# Altium footprint library MY_LIB_Connectors.PcbLib: 358 footprints (part 2 of 23)
Each footprint in its own frame and in the unit in brackets; x right, y up, seen from the top. Pads: shape width x height; smd on the part's side, far side on the other; paste and mask are expansions set on the pad; w line width, h text height; cw(c..) or ccw(c..) is an arc to the next point about the centre after c.
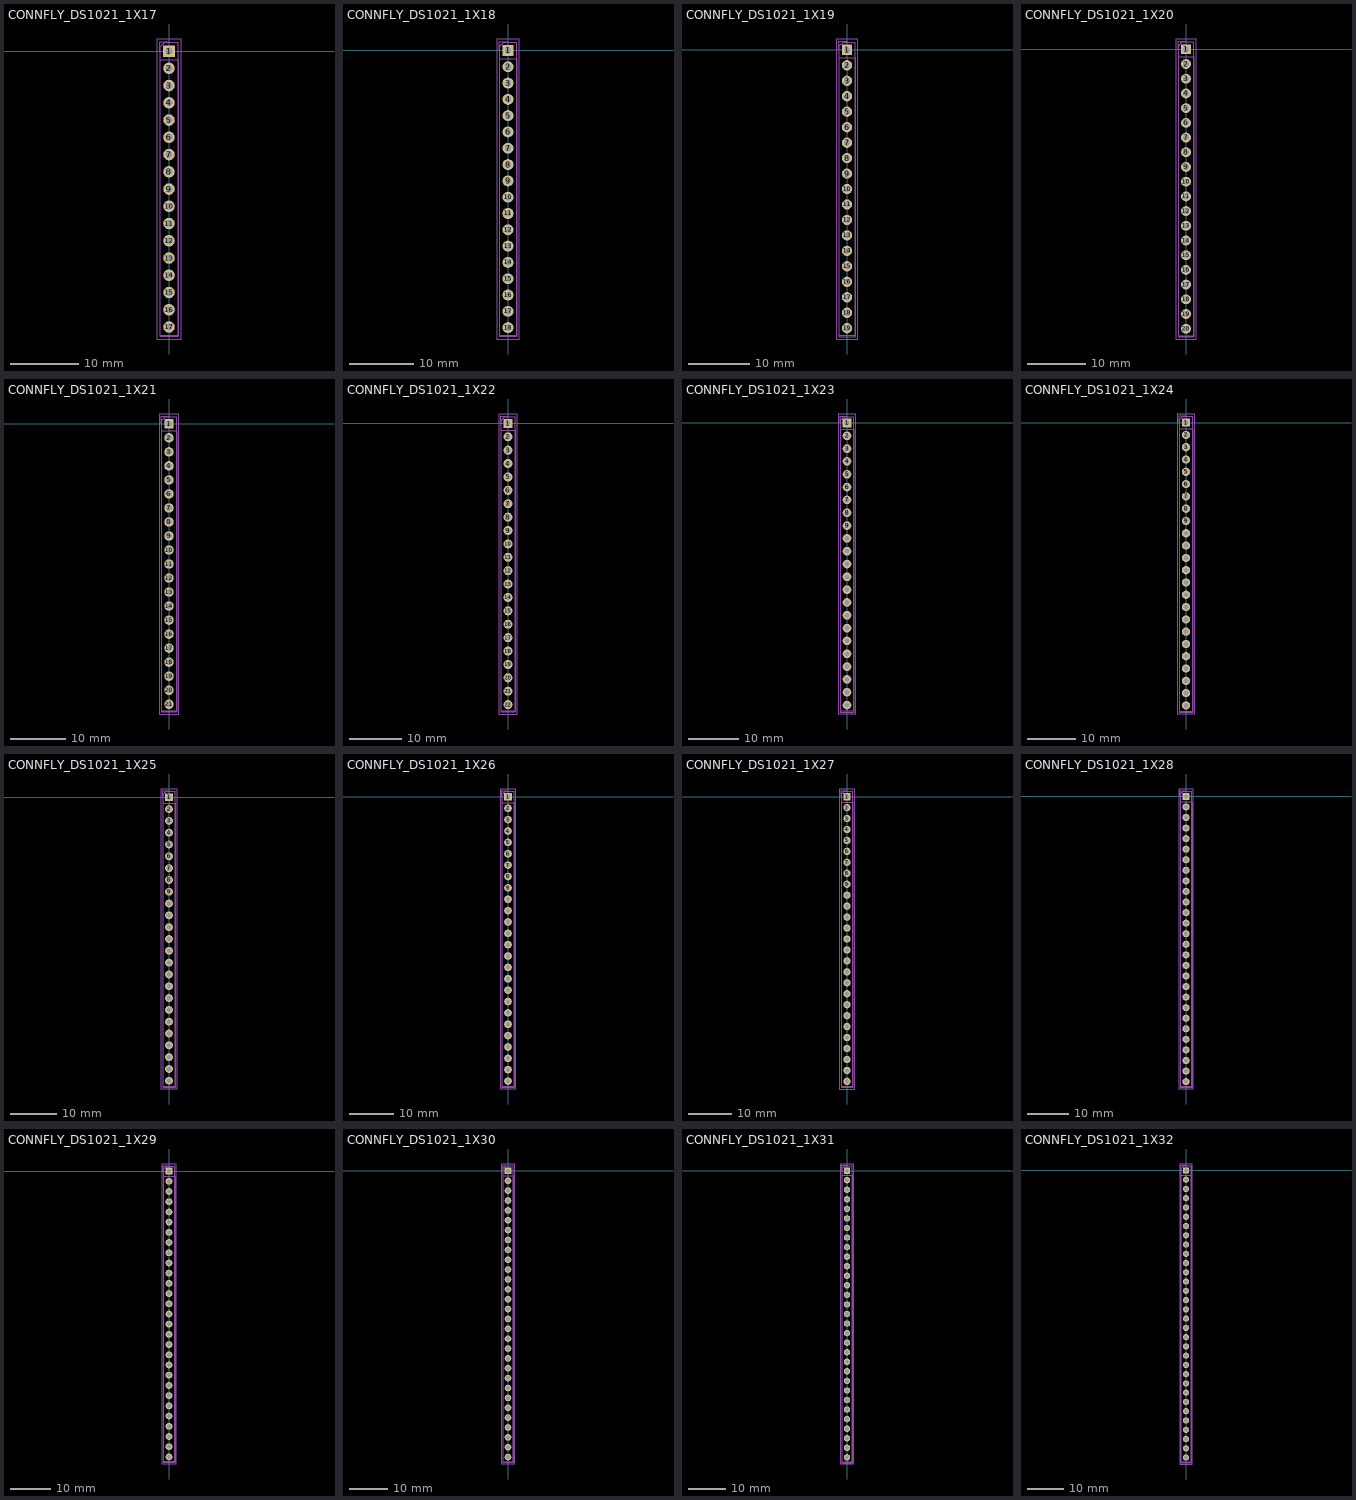
[diagram p1: the footprints below, top view; thin cyan lines are the x and y axes]

## CONNFLY_DS1021_1X17 [mm] "Connfly DS1021 1x17 standard KiCad; PTH1.0 pad1.7 pitch2.54; CC-BY-SA-4.0; STEP generic"
height 8.54
pads (17):
  rect 1.7x1.7 hole 1 paste-2539.97 mask+0.05: 1(0,0)
  round 1.7 hole 1 paste-2539.97 mask+0.05: 2(0,-2.54) 3(0,-5.08) 4(0,-7.62) 5(0,-10.16) 6(0,-12.7) 7(0,-15.24) 8(0,-17.78) 9(0,-20.32) 10(0,-22.86) 11(0,-25.4) 12(0,-27.94) 13(0,-30.48) 14(0,-33.02) 15(0,-35.56) 16(0,-38.1) 17(0,-40.64)
Mechanical 15:
  lines w0.05: -1.77,-42.41 -1.77,1.78 1.77,1.78 1.77,-42.41 -1.77,-42.41
  lines w0.1: -1.27,-41.91 -1.27,0.635 -0.635,1.27 1.27,1.27 1.27,-41.91 -1.27,-41.91
  lines w0.12: -1.38,0 -1.38,1.38 0,1.38 ; -1.38,-42.02 -1.38,-1.27 1.38,-1.27 1.38,-42.02 -1.38,-42.02
3D body "PinHeader_1x17_P2.54mm_Vertical.step": height 8.54, standoff -3, extent -1.27,-41.91 1.27,1.27

## CONNFLY_DS1021_1X18 [mm] "Connfly DS1021 1x18 standard KiCad; PTH1.0 pad1.7 pitch2.54; CC-BY-SA-4.0; STEP generic"
height 8.54
pads (18):
  rect 1.7x1.7 hole 1 paste-2539.97 mask+0.05: 1(0,0)
  round 1.7 hole 1 paste-2539.97 mask+0.05: 2(0,-2.54) 3(0,-5.08) 4(0,-7.62) 5(0,-10.16) 6(0,-12.7) 7(0,-15.24) 8(0,-17.78) 9(0,-20.32) 10(0,-22.86) 11(0,-25.4) 12(0,-27.94) 13(0,-30.48) 14(0,-33.02) 15(0,-35.56) 16(0,-38.1) 17(0,-40.64) 18(0,-43.18)
Mechanical 15:
  lines w0.05: -1.77,-44.95 -1.77,1.78 1.77,1.78 1.77,-44.95 -1.77,-44.95
  lines w0.1: -1.27,-44.45 -1.27,0.635 -0.635,1.27 1.27,1.27 1.27,-44.45 -1.27,-44.45
  lines w0.12: -1.38,0 -1.38,1.38 0,1.38 ; -1.38,-44.56 -1.38,-1.27 1.38,-1.27 1.38,-44.56 -1.38,-44.56
3D body "PinHeader_1x18_P2.54mm_Vertical.step": height 8.54, standoff -3, extent -1.27,-44.45 1.27,1.27

## CONNFLY_DS1021_1X19 [mm] "Connfly DS1021 1x19 standard KiCad; PTH1.0 pad1.7 pitch2.54; CC-BY-SA-4.0; STEP generic"
height 8.54
pads (19):
  rect 1.7x1.7 hole 1 paste-2539.97 mask+0.05: 1(0,0)
  round 1.7 hole 1 paste-2539.97 mask+0.05: 2(0,-2.54) 3(0,-5.08) 4(0,-7.62) 5(0,-10.16) 6(0,-12.7) 7(0,-15.24) 8(0,-17.78) 9(0,-20.32) 10(0,-22.86) 11(0,-25.4) 12(0,-27.94) 13(0,-30.48) 14(0,-33.02) 15(0,-35.56) 16(0,-38.1) 17(0,-40.64) 18(0,-43.18) 19(0,-45.72)
Mechanical 15:
  lines w0.05: -1.77,-47.49 -1.77,1.78 1.77,1.78 1.77,-47.49 -1.77,-47.49
  lines w0.1: -1.27,-46.99 -1.27,0.635 -0.635,1.27 1.27,1.27 1.27,-46.99 -1.27,-46.99
  lines w0.12: -1.38,0 -1.38,1.38 0,1.38 ; -1.38,-47.1 -1.38,-1.27 1.38,-1.27 1.38,-47.1 -1.38,-47.1
3D body "PinHeader_1x19_P2.54mm_Vertical.step": height 8.54, standoff -3, extent -1.27,-46.99 1.27,1.27

## CONNFLY_DS1021_1X20 [mm] "Connfly DS1021 1x20 standard KiCad; PTH1.0 pad1.7 pitch2.54; CC-BY-SA-4.0; STEP generic"
height 8.54
pads (20):
  rect 1.7x1.7 hole 1 paste-2539.97 mask+0.05: 1(0,0)
  round 1.7 hole 1 paste-2539.97 mask+0.05: 2(0,-2.54) 3(0,-5.08) 4(0,-7.62) 5(0,-10.16) 6(0,-12.7) 7(0,-15.24) 8(0,-17.78) 9(0,-20.32) 10(0,-22.86) 11(0,-25.4) 12(0,-27.94) 13(0,-30.48) 14(0,-33.02) 15(0,-35.56) 16(0,-38.1) 17(0,-40.64) 18(0,-43.18) 19(0,-45.72) 20(0,-48.26)
Mechanical 15:
  lines w0.05: -1.77,-50.03 -1.77,1.78 1.77,1.78 1.77,-50.03 -1.77,-50.03
  lines w0.1: -1.27,-49.53 -1.27,0.635 -0.635,1.27 1.27,1.27 1.27,-49.53 -1.27,-49.53
  lines w0.12: -1.38,0 -1.38,1.38 0,1.38 ; -1.38,-49.64 -1.38,-1.27 1.38,-1.27 1.38,-49.64 -1.38,-49.64
3D body "PinHeader_1x20_P2.54mm_Vertical.step": height 8.54, standoff -3, extent -1.27,-49.53 1.27,1.27

## CONNFLY_DS1021_1X21 [mm] "Connfly DS1021 1x21 standard KiCad; PTH1.0 pad1.7 pitch2.54; CC-BY-SA-4.0; STEP generic"
height 8.54
pads (21):
  rect 1.7x1.7 hole 1 paste-2539.97 mask+0.05: 1(0,0)
  round 1.7 hole 1 paste-2539.97 mask+0.05: 2(0,-2.54) 3(0,-5.08) 4(0,-7.62) 5(0,-10.16) 6(0,-12.7) 7(0,-15.24) 8(0,-17.78) 9(0,-20.32) 10(0,-22.86) 11(0,-25.4) 12(0,-27.94) 13(0,-30.48) 14(0,-33.02) 15(0,-35.56) 16(0,-38.1) 17(0,-40.64) 18(0,-43.18) 19(0,-45.72) 20(0,-48.26) 21(0,-50.8)
Mechanical 15:
  lines w0.05: -1.77,-52.57 -1.77,1.78 1.77,1.78 1.77,-52.57 -1.77,-52.57
  lines w0.1: -1.27,-52.07 -1.27,0.635 -0.635,1.27 1.27,1.27 1.27,-52.07 -1.27,-52.07
  lines w0.12: -1.38,0 -1.38,1.38 0,1.38 ; -1.38,-52.18 -1.38,-1.27 1.38,-1.27 1.38,-52.18 -1.38,-52.18
3D body "PinHeader_1x21_P2.54mm_Vertical.step": height 8.54, standoff -3, extent -1.27,-52.07 1.27,1.27

## CONNFLY_DS1021_1X22 [mm] "Connfly DS1021 1x22 standard KiCad; PTH1.0 pad1.7 pitch2.54; CC-BY-SA-4.0; STEP generic"
height 8.54
pads (22):
  rect 1.7x1.7 hole 1 paste-2539.97 mask+0.05: 1(0,0)
  round 1.7 hole 1 paste-2539.97 mask+0.05: 2(0,-2.54) 3(0,-5.08) 4(0,-7.62) 5(0,-10.16) 6(0,-12.7) 7(0,-15.24) 8(0,-17.78) 9(0,-20.32) 10(0,-22.86) 11(0,-25.4) 12(0,-27.94) 13(0,-30.48) 14(0,-33.02) 15(0,-35.56) 16(0,-38.1) 17(0,-40.64) 18(0,-43.18) 19(0,-45.72) 20(0,-48.26) 21(0,-50.8) 22(0,-53.34)
Mechanical 15:
  lines w0.05: -1.77,-55.12 -1.77,1.78 1.77,1.78 1.77,-55.12 -1.77,-55.12
  lines w0.1: -1.27,-54.61 -1.27,0.635 -0.635,1.27 1.27,1.27 1.27,-54.61 -1.27,-54.61
  lines w0.12: -1.38,0 -1.38,1.38 0,1.38 ; -1.38,-54.72 -1.38,-1.27 1.38,-1.27 1.38,-54.72 -1.38,-54.72
3D body "PinHeader_1x22_P2.54mm_Vertical.step": height 8.54, standoff -3, extent -1.27,-54.61 1.27,1.27

## CONNFLY_DS1021_1X23 [mm] "Connfly DS1021 1x23 standard KiCad; PTH1.0 pad1.7 pitch2.54; CC-BY-SA-4.0; STEP generic"
height 8.54
pads (23):
  rect 1.7x1.7 hole 1 paste-2539.97 mask+0.05: 1(0,0)
  round 1.7 hole 1 paste-2539.97 mask+0.05: 2(0,-2.54) 3(0,-5.08) 4(0,-7.62) 5(0,-10.16) 6(0,-12.7) 7(0,-15.24) 8(0,-17.78) 9(0,-20.32) 10(0,-22.86) 11(0,-25.4) 12(0,-27.94) 13(0,-30.48) 14(0,-33.02) 15(0,-35.56) 16(0,-38.1) 17(0,-40.64) 18(0,-43.18) 19(0,-45.72) 20(0,-48.26) 21(0,-50.8) 22(0,-53.34) 23(0,-55.88)
Mechanical 15:
  lines w0.05: -1.77,-57.65 -1.77,1.78 1.77,1.78 1.77,-57.65 -1.77,-57.65
  lines w0.1: -1.27,-57.15 -1.27,0.635 -0.635,1.27 1.27,1.27 1.27,-57.15 -1.27,-57.15
  lines w0.12: -1.38,0 -1.38,1.38 0,1.38 ; -1.38,-57.26 -1.38,-1.27 1.38,-1.27 1.38,-57.26 -1.38,-57.26
3D body "PinHeader_1x23_P2.54mm_Vertical.step": height 8.54, standoff -3, extent -1.27,-57.15 1.27,1.27

## CONNFLY_DS1021_1X24 [mm] "Connfly DS1021 1x24 standard KiCad; PTH1.0 pad1.7 pitch2.54; CC-BY-SA-4.0; STEP generic"
height 8.54
pads (24):
  rect 1.7x1.7 hole 1 paste-2539.97 mask+0.05: 1(0,0)
  round 1.7 hole 1 paste-2539.97 mask+0.05: 2(0,-2.54) 3(0,-5.08) 4(0,-7.62) 5(0,-10.16) 6(0,-12.7) 7(0,-15.24) 8(0,-17.78) 9(0,-20.32) 10(0,-22.86) 11(0,-25.4) 12(0,-27.94) 13(0,-30.48) 14(0,-33.02) 15(0,-35.56) 16(0,-38.1) 17(0,-40.64) 18(0,-43.18) 19(0,-45.72) 20(0,-48.26) 21(0,-50.8) 22(0,-53.34) 23(0,-55.88) 24(0,-58.42)
Mechanical 15:
  lines w0.05: -1.77,-60.19 -1.77,1.78 1.77,1.78 1.77,-60.19 -1.77,-60.19
  lines w0.1: -1.27,-59.69 -1.27,0.635 -0.635,1.27 1.27,1.27 1.27,-59.69 -1.27,-59.69
  lines w0.12: -1.38,0 -1.38,1.38 0,1.38 ; -1.38,-59.8 -1.38,-1.27 1.38,-1.27 1.38,-59.8 -1.38,-59.8
3D body "PinHeader_1x24_P2.54mm_Vertical.step": height 8.54, standoff -3, extent -1.27,-59.69 1.27,1.27

## CONNFLY_DS1021_1X25 [mm] "Connfly DS1021 1x25 standard KiCad; PTH1.0 pad1.7 pitch2.54; CC-BY-SA-4.0; STEP generic"
height 8.54
pads (25):
  rect 1.7x1.7 hole 1 paste-2539.97 mask+0.05: 1(0,0)
  round 1.7 hole 1 paste-2539.97 mask+0.05: 2(0,-2.54) 3(0,-5.08) 4(0,-7.62) 5(0,-10.16) 6(0,-12.7) 7(0,-15.24) 8(0,-17.78) 9(0,-20.32) 10(0,-22.86) 11(0,-25.4) 12(0,-27.94) 13(0,-30.48) 14(0,-33.02) 15(0,-35.56) 16(0,-38.1) 17(0,-40.64) 18(0,-43.18) 19(0,-45.72) 20(0,-48.26) 21(0,-50.8) 22(0,-53.34) 23(0,-55.88) 24(0,-58.42) 25(0,-60.96)
Mechanical 15:
  lines w0.05: -1.77,-62.73 -1.77,1.77 1.77,1.77 1.77,-62.73 -1.77,-62.73
  lines w0.1: -1.27,-62.23 -1.27,0.635 -0.635,1.27 1.27,1.27 1.27,-62.23 -1.27,-62.23
  lines w0.12: -1.38,0 -1.38,1.38 0,1.38 ; -1.38,-62.34 -1.38,-1.27 1.38,-1.27 1.38,-62.34 -1.38,-62.34
3D body "PinHeader_1x25_P2.54mm_Vertical.step": height 8.54, standoff -3, extent -1.27,-62.23 1.27,1.27

## CONNFLY_DS1021_1X26 [mm] "Connfly DS1021 1x26 standard KiCad; PTH1.0 pad1.7 pitch2.54; CC-BY-SA-4.0; STEP generic"
height 8.54
pads (26):
  rect 1.7x1.7 hole 1 paste-2539.97 mask+0.05: 1(0,0)
  round 1.7 hole 1 paste-2539.97 mask+0.05: 2(0,-2.54) 3(0,-5.08) 4(0,-7.62) 5(0,-10.16) 6(0,-12.7) 7(0,-15.24) 8(0,-17.78) 9(0,-20.32) 10(0,-22.86) 11(0,-25.4) 12(0,-27.94) 13(0,-30.48) 14(0,-33.02) 15(0,-35.56) 16(0,-38.1) 17(0,-40.64) 18(0,-43.18) 19(0,-45.72) 20(0,-48.26) 21(0,-50.8) 22(0,-53.34) 23(0,-55.88) 24(0,-58.42) 25(0,-60.96) 26(0,-63.5)
Mechanical 15:
  lines w0.05: -1.77,-65.27 -1.77,1.77 1.77,1.77 1.77,-65.27 -1.77,-65.27
  lines w0.1: -1.27,-64.77 -1.27,0.635 -0.635,1.27 1.27,1.27 1.27,-64.77 -1.27,-64.77
  lines w0.12: -1.38,0 -1.38,1.38 0,1.38 ; -1.38,-64.88 -1.38,-1.27 1.38,-1.27 1.38,-64.88 -1.38,-64.88
3D body "PinHeader_1x26_P2.54mm_Vertical.step": height 8.54, standoff -3, extent -1.27,-64.77 1.27,1.27

## CONNFLY_DS1021_1X27 [mm] "Connfly DS1021 1x27 standard KiCad; PTH1.0 pad1.7 pitch2.54; CC-BY-SA-4.0; STEP generic"
height 8.54
pads (27):
  rect 1.7x1.7 hole 1 paste-2539.97 mask+0.05: 1(0,0)
  round 1.7 hole 1 paste-2539.97 mask+0.05: 2(0,-2.54) 3(0,-5.08) 4(0,-7.62) 5(0,-10.16) 6(0,-12.7) 7(0,-15.24) 8(0,-17.78) 9(0,-20.32) 10(0,-22.86) 11(0,-25.4) 12(0,-27.94) 13(0,-30.48) 14(0,-33.02) 15(0,-35.56) 16(0,-38.1) 17(0,-40.64) 18(0,-43.18) 19(0,-45.72) 20(0,-48.26) 21(0,-50.8) 22(0,-53.34) 23(0,-55.88) 24(0,-58.42) 25(0,-60.96) 26(0,-63.5) 27(0,-66.04)
Mechanical 15:
  lines w0.05: -1.77,-67.81 -1.77,1.77 1.77,1.77 1.77,-67.81 -1.77,-67.81
  lines w0.1: -1.27,-67.31 -1.27,0.635 -0.635,1.27 1.27,1.27 1.27,-67.31 -1.27,-67.31
  lines w0.12: -1.38,0 -1.38,1.38 0,1.38 ; -1.38,-67.42 -1.38,-1.27 1.38,-1.27 1.38,-67.42 -1.38,-67.42
3D body "PinHeader_1x27_P2.54mm_Vertical.step": height 8.54, standoff -3, extent -1.27,-67.31 1.27,1.27

## CONNFLY_DS1021_1X28 [mm] "Connfly DS1021 1x28 standard KiCad; PTH1.0 pad1.7 pitch2.54; CC-BY-SA-4.0; STEP generic"
height 8.54
pads (28):
  rect 1.7x1.7 hole 1 paste-2539.97 mask+0.05: 1(0,0)
  round 1.7 hole 1 paste-2539.97 mask+0.05: 2(0,-2.54) 3(0,-5.08) 4(0,-7.62) 5(0,-10.16) 6(0,-12.7) 7(0,-15.24) 8(0,-17.78) 9(0,-20.32) 10(0,-22.86) 11(0,-25.4) 12(0,-27.94) 13(0,-30.48) 14(0,-33.02) 15(0,-35.56) 16(0,-38.1) 17(0,-40.64) 18(0,-43.18) 19(0,-45.72) 20(0,-48.26) 21(0,-50.8) 22(0,-53.34) 23(0,-55.88) 24(0,-58.42) 25(0,-60.96) 26(0,-63.5) 27(0,-66.04) 28(0,-68.58)
Mechanical 15:
  lines w0.05: -1.77,-70.35 -1.77,1.77 1.77,1.77 1.77,-70.35 -1.77,-70.35
  lines w0.1: -1.27,-69.85 -1.27,0.635 -0.635,1.27 1.27,1.27 1.27,-69.85 -1.27,-69.85
  lines w0.12: -1.38,0 -1.38,1.38 0,1.38 ; -1.38,-69.96 -1.38,-1.27 1.38,-1.27 1.38,-69.96 -1.38,-69.96
3D body "PinHeader_1x28_P2.54mm_Vertical.step": height 8.54, standoff -3, extent -1.27,-69.85 1.27,1.27

## CONNFLY_DS1021_1X29 [mm] "Connfly DS1021 1x29 standard KiCad; PTH1.0 pad1.7 pitch2.54; CC-BY-SA-4.0; STEP generic"
height 8.54
pads (29):
  rect 1.7x1.7 hole 1 paste-2539.97 mask+0.05: 1(0,0)
  round 1.7 hole 1 paste-2539.97 mask+0.05: 2(0,-2.54) 3(0,-5.08) 4(0,-7.62) 5(0,-10.16) 6(0,-12.7) 7(0,-15.24) 8(0,-17.78) 9(0,-20.32) 10(0,-22.86) 11(0,-25.4) 12(0,-27.94) 13(0,-30.48) 14(0,-33.02) 15(0,-35.56) 16(0,-38.1) 17(0,-40.64) 18(0,-43.18) 19(0,-45.72) 20(0,-48.26) 21(0,-50.8) 22(0,-53.34) 23(0,-55.88) 24(0,-58.42) 25(0,-60.96) 26(0,-63.5) 27(0,-66.04) 28(0,-68.58) 29(0,-71.12)
Mechanical 15:
  lines w0.05: -1.77,-72.89 -1.77,1.77 1.77,1.77 1.77,-72.89 -1.77,-72.89
  lines w0.1: -1.27,-72.39 -1.27,0.635 -0.635,1.27 1.27,1.27 1.27,-72.39 -1.27,-72.39
  lines w0.12: -1.38,0 -1.38,1.38 0,1.38 ; -1.38,-72.5 -1.38,-1.27 1.38,-1.27 1.38,-72.5 -1.38,-72.5
3D body "PinHeader_1x29_P2.54mm_Vertical.step": height 8.54, standoff -3, extent -1.27,-72.39 1.27,1.27

## CONNFLY_DS1021_1X30 [mm] "Connfly DS1021 1x30 standard KiCad; PTH1.0 pad1.7 pitch2.54; CC-BY-SA-4.0; STEP generic"
height 8.54
pads (30):
  rect 1.7x1.7 hole 1 paste-2539.97 mask+0.05: 1(0,0)
  round 1.7 hole 1 paste-2539.97 mask+0.05: 2(0,-2.54) 3(0,-5.08) 4(0,-7.62) 5(0,-10.16) 6(0,-12.7) 7(0,-15.24) 8(0,-17.78) 9(0,-20.32) 10(0,-22.86) 11(0,-25.4) 12(0,-27.94) 13(0,-30.48) 14(0,-33.02) 15(0,-35.56) 16(0,-38.1) 17(0,-40.64) 18(0,-43.18) 19(0,-45.72) 20(0,-48.26) 21(0,-50.8) 22(0,-53.34) 23(0,-55.88) 24(0,-58.42) 25(0,-60.96) 26(0,-63.5) 27(0,-66.04) 28(0,-68.58) 29(0,-71.12) 30(0,-73.66)
Mechanical 15:
  lines w0.05: -1.77,-75.43 -1.77,1.77 1.77,1.77 1.77,-75.43 -1.77,-75.43
  lines w0.1: -1.27,-74.93 -1.27,0.635 -0.635,1.27 1.27,1.27 1.27,-74.93 -1.27,-74.93
  lines w0.12: -1.38,0 -1.38,1.38 0,1.38 ; -1.38,-75.04 -1.38,-1.27 1.38,-1.27 1.38,-75.04 -1.38,-75.04
3D body "PinHeader_1x30_P2.54mm_Vertical.step": height 8.54, standoff -3, extent -1.27,-74.93 1.27,1.27

## CONNFLY_DS1021_1X31 [mm] "Connfly DS1021 1x31 standard KiCad; PTH1.0 pad1.7 pitch2.54; CC-BY-SA-4.0; STEP generic"
height 8.54
pads (31):
  rect 1.7x1.7 hole 1 paste-2539.97 mask+0.05: 1(0,0)
  round 1.7 hole 1 paste-2539.97 mask+0.05: 2(0,-2.54) 3(0,-5.08) 4(0,-7.62) 5(0,-10.16) 6(0,-12.7) 7(0,-15.24) 8(0,-17.78) 9(0,-20.32) 10(0,-22.86) 11(0,-25.4) 12(0,-27.94) 13(0,-30.48) 14(0,-33.02) 15(0,-35.56) 16(0,-38.1) 17(0,-40.64) 18(0,-43.18) 19(0,-45.72) 20(0,-48.26) 21(0,-50.8) 22(0,-53.34) 23(0,-55.88) 24(0,-58.42) 25(0,-60.96) 26(0,-63.5) 27(0,-66.04) 28(0,-68.58) 29(0,-71.12) 30(0,-73.66) 31(0,-76.2)
Mechanical 15:
  lines w0.05: -1.77,-77.97 -1.77,1.77 1.77,1.77 1.77,-77.97 -1.77,-77.97
  lines w0.1: -1.27,-77.47 -1.27,0.635 -0.635,1.27 1.27,1.27 1.27,-77.47 -1.27,-77.47
  lines w0.12: -1.38,0 -1.38,1.38 0,1.38 ; -1.38,-77.58 -1.38,-1.27 1.38,-1.27 1.38,-77.58 -1.38,-77.58
3D body "PinHeader_1x31_P2.54mm_Vertical.step": height 8.54, standoff -3, extent -1.27,-77.47 1.27,1.27

## CONNFLY_DS1021_1X32 [mm] "Connfly DS1021 1x32 standard KiCad; PTH1.0 pad1.7 pitch2.54; CC-BY-SA-4.0; STEP generic"
height 8.54
pads (32):
  rect 1.7x1.7 hole 1 paste-2539.97 mask+0.05: 1(0,0)
  round 1.7 hole 1 paste-2539.97 mask+0.05: 2(0,-2.54) 3(0,-5.08) 4(0,-7.62) 5(0,-10.16) 6(0,-12.7) 7(0,-15.24) 8(0,-17.78) 9(0,-20.32) 10(0,-22.86) 11(0,-25.4) 12(0,-27.94) 13(0,-30.48) 14(0,-33.02) 15(0,-35.56) 16(0,-38.1) 17(0,-40.64) 18(0,-43.18) 19(0,-45.72) 20(0,-48.26) 21(0,-50.8) 22(0,-53.34) 23(0,-55.88) 24(0,-58.42) 25(0,-60.96) 26(0,-63.5) 27(0,-66.04) 28(0,-68.58) 29(0,-71.12) 30(0,-73.66) 31(0,-76.2) 32(0,-78.74)
Mechanical 15:
  lines w0.05: -1.77,-80.51 -1.77,1.77 1.77,1.77 1.77,-80.51 -1.77,-80.51
  lines w0.1: -1.27,-80.01 -1.27,0.635 -0.635,1.27 1.27,1.27 1.27,-80.01 -1.27,-80.01
  lines w0.12: -1.38,0 -1.38,1.38 0,1.38 ; -1.38,-80.12 -1.38,-1.27 1.38,-1.27 1.38,-80.12 -1.38,-80.12
3D body "PinHeader_1x32_P2.54mm_Vertical.step": height 8.54, standoff -3, extent -1.27,-80.01 1.27,1.27